# Altium schematic symbol library Connectors.SchLib: 32 symbols
Pins are listed as number, name and electrical type; pins without a type are passive.

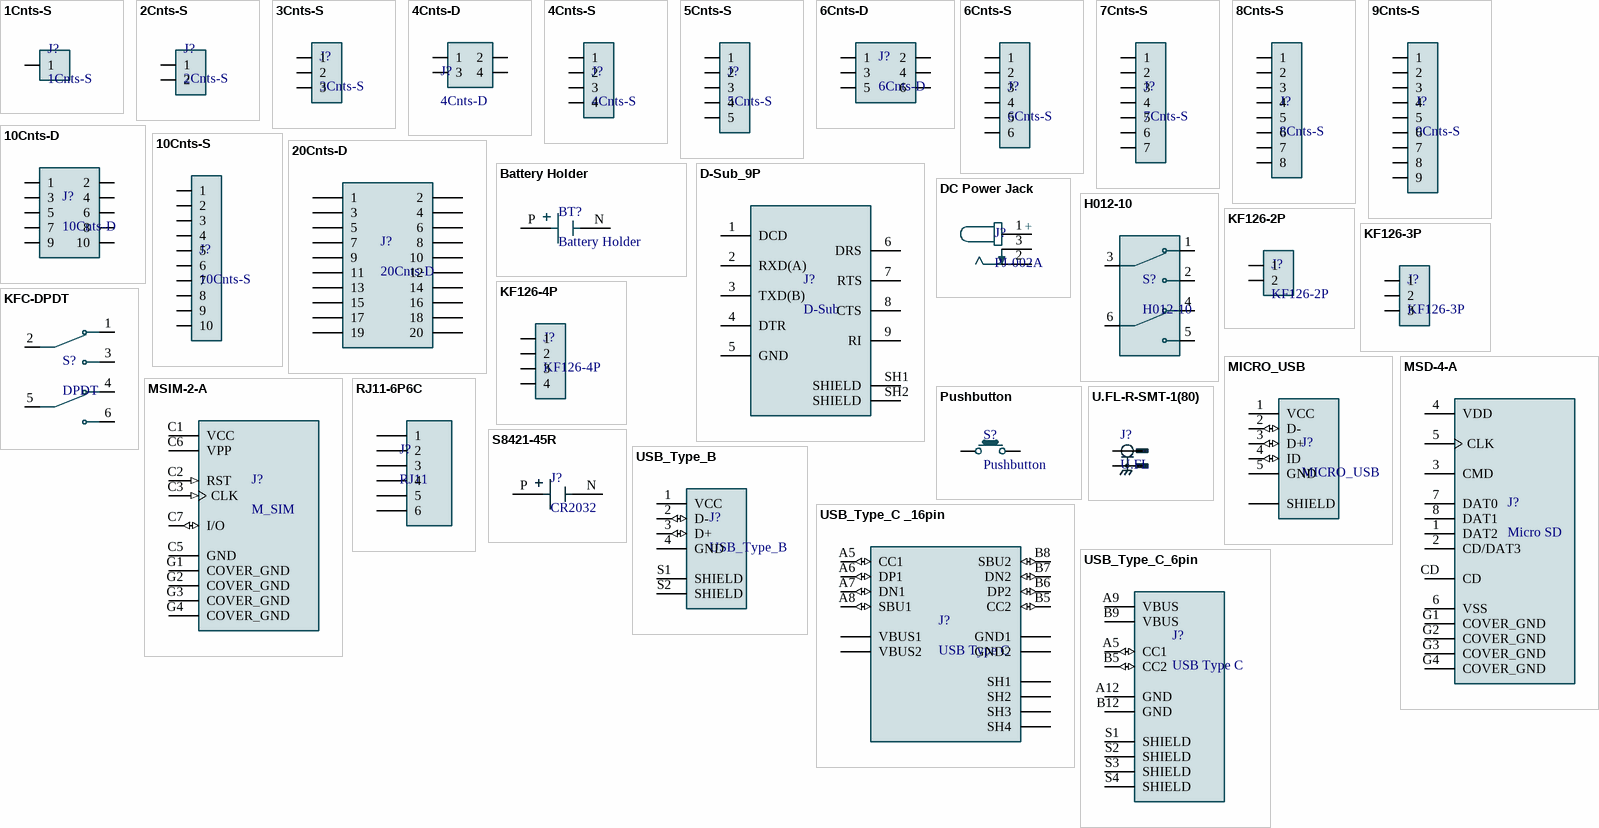
[diagram p0: symbols 1Cnts-S to USB_Type_C_6pin]

## 1Cnts-S
designator J?
MP: MTSW-101-09-G-D-235; Package: None; Price: None; Value: *; Availability: Unavailable
footprint 1Cnts-S
footprint 1Cnts-smart-terminal
footprint 1Cnts-S-Touch (1Cnts-S-Touch-sensor)
footprint Hole3 (3mm)
footprint Hole2 (2mm)
pins: 1

## 2Cnts-S
designator J?
MP: MTSW-101-09-G-D-235; Package: None; Price: None; Value: *; Availability: Unavailable
footprint 2Cnts-S
footprint 2CNTS-Molex
footprint 2CNTS-PH-2mm (JST_B2B-2CNTS-PH-2mm)
footprint 2CNTS-XH-2.5mm (JST_B2B-2CNTS-XH-2.5mm)
footprint 2Cnts-S-Right
footprint 2CNTS-XH-2.5mm-SMD (2pin 2515connecor 2.54 mm pitch male smd)
pins: 1, 2

## 3Cnts-S
designator J?
MP: MTSW-104-06-T-S-115; Price: None; Value: *; Availability: Unavailable; Package: None
footprint 3Cnts-S
footprint 3CNTS-PH-2mm (JST_B2B-3CNTS-PH-2mm)
footprint 3CNTS-XH-2.5mm (JST_B2B-3CNTS-XH-2.5mm)
footprint 3CNTS-XH-2.5mm-SMD (3pin 2515connecor 2.54 mm pitch male smd)
pins: 1, 2, 3

## 4Cnts-D
designator J?
MP: MTSW-103-22-S-D-430; Package: None; Price: None; Value: *; Availability: Unavailable
footprint 4Cnts-D-SMD
pins: 1, 2, 3, 4

## 4Cnts-S
designator J?
MP: MTSW-104-06-T-S-115; Price: None; Value: *; Availability: Unavailable; Package: None
footprint 4Cnts-S
footprint 4CNTS-PH-2mm (JST_B2B-4CNTS-PH-2mm)
footprint 4CNTS-XH-2.5mm (JST_B2B-4CNTS-XH-2.5mm)
footprint 4CNTS-XH-2.5mm-SMD (4pin 2515connecor 2.54 mm pitch male smd)
pins: 1, 2, 3, 4

## 5Cnts-S
designator J?
MP: MTSW-105-10-G-S-640; Price: None; Availability: Unavailable; Value: *; Package: None
footprint 5Cnts-S
footprint 5CNTS-PH-2mm (JST_B2B-5CNTS-PH-2mm)
footprint 5CNTS-XH-2.5mm (JST_B2B-5CNTS-XH-2.5mm)
footprint 5CNTS-XH-2.5mm-SMD (5pin 2515connecor 2.54 mm pitch male smd)
pins: 1, 2, 3, 4, 5

## 6Cnts-D
designator J?
MP: MTSW-103-22-S-D-430; Package: None; Price: None; Value: *; Availability: Unavailable
footprint 6Cnts-D
footprint 6Cnts-D-SMD
pins: 1, 2, 3, 4, 5, 6

## 6Cnts-S
designator J?
MF: Samtec Inc.; MP: TSW-106-XX-X-S; Availability: Unavailable; Package: None; Price: None; Value: *
footprint 6Cnts-S
footprint 6CNTS-XH-2.5mm (JST_B2B-6CNTS-XH-2.5mm)
footprint 6CNTS-PH-2mm (JST_B2B-6CNTS-PH-2mm)
footprint 6CNTS-XH-2.5mm-SMD (6pin 2515connecor 2.54 mm pitch male smd)
pins: 1, 2, 3, 4, 5, 6

## 7Cnts-S
designator J?
MF: Samtec Inc.; MP: TSW-106-XX-X-S; Availability: Unavailable; Package: None; Price: None; Value: *
footprint 7CNTS-XH-2.5mm (JST_B2B-7CNTS-XH-2.5mm)
footprint 7CNTS-PH-2mm (JST_B2B-7CNTS-PH-2mm)
footprint 7CNTS-XH-2.5mm-SMD (7pin 2515connecor 2.54 mm pitch male smd)
pins: 1, 2, 3, 4, 5, 6, 7

## 8Cnts-S
designator J?
MF: Samtec Inc.; MP: TSW-106-XX-X-S; Availability: Unavailable; Package: None; Price: None; Value: *
footprint 8Cnts-S
footprint 8CNTS-XH-2.5mm (JST_B2B-8CNTS-XH-2.5mm)
footprint 8CNTS-PH-2mm (JST_B2B-8CNTS-PH-2mm)
footprint 8CNTS-XH-2.5mm-SMD (8pin 2515connecor 2.54 mm pitch male smd)
pins: 1, 2, 3, 4, 5, 6, 7, 8

## 9Cnts-S
designator J?
MF: Samtec Inc.; MP: TSW-106-XX-X-S; Availability: Unavailable; Package: None; Price: None; Value: *
footprint 9CNTS-XH-2.5mm (JST_B2B-9CNTS-XH-2.5mm)
footprint 9CNTS-PH-2mm (JST_B2B-9CNTS-PH-2mm)
footprint 9CNTS-XH-2.5mm-SMD (9pin 2515connecor 2.54 mm pitch male smd)
pins: 1, 2, 3, 4, 5, 6, 7, 8, 9

## 10Cnts-D
designator J?
MP: MTSW-105-24-T-D-290; MF: Samtec; SnapEDA_Link: https://www.snapeda.com/parts/MTSW-105-24-T-D-290/Samtec/view-part/?ref=snap; Availability: In Stock; Package: None; Check_prices: https://www.snapeda.com/parts/MTSW-105-24-T-D-290/Samtec/view-part/?ref=eda; Value: *; Purchase-URL: https://pricing.snapeda.com/search/part/MTSW-105-24-T-D-290/?ref=eda; Price: None
footprint 10Cnts-D
pins: 1, 2, 3, 4, 5, 6, 7, 8, 9, 10

## 10Cnts-S
designator J?
MF: Samtec Inc.; MP: TSW-106-XX-X-S; Availability: Unavailable; Package: None; Price: None; Value: *
footprint 10CNTS-XH-2.5mm (JST_B2B-10CNTS-XH-2.5mm)
footprint 10CNTS-PH-2mm (JST_B2B-10CNTS-PH-2mm)
footprint 10CNTS-XH-2.5mm-SMD (10pin 2515connecor 2.54 mm pitch male smd)
pins: 1, 2, 3, 4, 5, 6, 7, 8, 9, 10

## 20Cnts-D
designator J?
Centerline_Pitch: 2.54 mm[.1 in]; Product_Type: Connector; MP: 103309-5; Number_of_Positions: 20; MF: TE Connectivity; Package: None; Purchase-URL: https://pricing.snapeda.com/search/part/103309-5/?ref=eda; EU_RoHS_Compliance: Not Compliant; Check_prices: https://www.snapeda.com/parts/103309-5/TE%20Connectivity%20AMP%20Connectors/view-part/202097/?ref=eda; Value: *; SnapEDA_Link: https://www.snapeda.com/parts/103309-5/TE%20Connectivity%20AMP%20Connectors/view-part/202097/?ref=snap; Price: None; Availability: In Stock
footprint 20Cnts-D
pins: 1, 2, 3, 4, 5, 6, 7, 8, 9, 10, 11, 12, 13, 14, 15, 16, 17, 18, 19, 20

## Battery Holder
designator BT?
SMT Battery Holder; MF: Keystone Electronics; MP: 1050; SnapEDA_Link: https://www.snapeda.com/parts/1050/Keystone/view-part/?ref=snap; Package: NON STANDARD-3 Keystone; Value: *; Check_prices: https://www.snapeda.com/parts/1050/Keystone/view-part/?ref=eda
footprint 16340 (CR123A)
footprint 18650
pins: N NEG, P POS

## D-Sub_9P
designator J?, comment D-Sub
Connector D-Sub Standard PLUG FRNT MTLSHL 9P | TE Connectivity 5747840-4; Value: D-Sub_9P; Number_of_Positions: 9; Centerline_Pitch: 2.74 mm[.108 in]; Package: None; Digi-Key_Purchase_URL: https://www.digikey.de/product-detail/en/te-connectivity-amp-connectors/5747840-4/A32092-ND/808647?utm_source=snapeda&utm_medium=aggregator&utm_campaign=symbol; Digi-Key_Part_Number: A32092-ND; TE_purchase_URL: https://www.te.com/usa-en/product-5747840-4.html?te_bu=Cor&te_type=disp&te_campaign=seda_glo_cor-seda-global-disp-prtnr-fy19-seda-model-bom-cta_sma-317_1&elqCampaignId=32493; EU_RoHS_Compliance: Compliant; MP: 5747840-4; SnapEDA_Link: https://www.snapeda.com/parts/5747840-4/TE%20Connectivity%20AMP%20Connectors/view-part/550949/?ref=snap; Product_Type: Connector; MF: TE Connectivity
footprint D-Sub_9P (Connector D-Sub Standard PLUG FRNT MTLSHL 9P)
pins: 1 DCD, 2 RXD(A), 3 TXD(B), 4 DTR, 5 GND, 6 DRS, 7 RTS, 8 CTS, 9 RI, SH1 SHIELD, SH2 SHIELD

## DC Power Jack
designator J?, comment PJ-002A
2.0 x 6.5 mm, 2.5 A, Horizontal, Through Hole, Dc Power Jack Connector; MF: CUI Devices; MP: PJ-002A; Check_prices: https://www.snapeda.com/parts/PJ-002A/CUI+Devices/view-part/?ref=eda; Availability: In Stock; CUI_purchase_URL: https://www.cuidevices.com/product/interconnect/connectors/dc-power-connectors/jacks/pj-002a?utm_source=snapeda.com&utm_medium=referral&utm_campaign=snapedaBOM; SnapEDA_Link: https://www.snapeda.com/parts/PJ-002A/CUI+Devices/view-part/?ref=snap; Purchase-URL: https://pricing.snapeda.com/search/part/PJ-002A/?ref=eda; Price: None; Package: None; Value: *
footprint DC Power Jack (PJ-002A)
footprint DC Power Jack SMD (PJ-002AH-SMT)
pins: 1, 2, 3
text: +

## H012-10
designator S?
H012-10. DECC H012-10 Telephone Hook Switch. Telephone Hook Switch, 6 pins Used in Cyfral Smart-U; MF: Same Sky; MP: MPB04-2C33-S-D; SnapEDA_Link: https://www.snapeda.com/parts/MPB04-2C33-S-D/Same+Sky/view-part/?ref=snap; Package: None; Value: *; Check_prices: https://www.snapeda.com/parts/MPB04-2C33-S-D/Same+Sky/view-part/?ref=eda
footprint H012-10
pins: 1, 2, 3, 4, 5, 6

## KF126-2P
designator J?
Terminal Block Connector Wire Receptacle 2 5 mm 30-16 AWG Green 13.5 A 300 V | TE Connectivity 282836-2; SnapEDA_Link: https://www.snapeda.com/parts/282836-2/TE+Connectivity+AMP+Connectors/view-part/?ref=snap; Package: None; Value: KF126-2P; MF: TE Connectivity; MP: 282836-2; Check_prices: https://www.snapeda.com/parts/282836-2/TE+Connectivity+AMP+Connectors/view-part/?ref=eda
footprint KF126-2P
pins: 1, 2

## KF126-3P
designator J?
TERM BLOCK 3POS SIDE ENTRY 5MM; MP: 282836-3; Price: None; Value: KF126-3P; Package: None; Availability: Unavailable
footprint KF126-3P
pins: 1, 2, 3

## KF126-4P
designator J?
4 Position Wire to Board Terminal Block Horizontal with Board 0.197 (5.00mm) Through Hole; MP: 282836-4; MF: TE Connectivity; Package: None; Availability: In Stock; Value: KF126-4P; Purchase-URL: https://pricing.snapeda.com/search/part/282836-4/?ref=eda; Check_prices: https://www.snapeda.com/parts/282836-4/TE+Connectivity+AMP+Connectors/view-part/?ref=eda; Price: None; SnapEDA_Link: https://www.snapeda.com/parts/282836-4/TE+Connectivity+AMP+Connectors/view-part/?ref=snap
footprint KF126-4P
pins: 1, 2, 3, 4

## KFC-DPDT
designator S?, comment DPDT
Pushbutton Switch DPDT Standard Through Hole 7x7; MF: E-Switch; MP: TL2230EEF140; SnapEDA_Link: https://www.snapeda.com/parts/TL2230EEF140/E-Switch/view-part/?ref=snap; Package: None; Value: *; Check_prices: https://www.snapeda.com/parts/TL2230EEF140/E-Switch/view-part/?ref=eda
footprint KFC-DPDT (Pushbutton Switch DPDT Standard Through Hole 7x7)
pins: 1 NC1, 2 COM1, 3 NO1, 4 NC2, 5 COM2, 6 NO2

## MICRO_USB
designator J?
MICROQTJ; MF: shou han; SnapEDA_Link: https://www.snapeda.com/parts/MICROQTJ/Shouhan/view-part/?ref=snap; Package: None; Value: *; MP: MICROQTJ; Check_prices: https://www.snapeda.com/parts/MICROQTJ/Shouhan/view-part/?ref=eda
footprint MICRO_USB (MICROQTJ)
pins: 1 VCC (power), 2 D- (io), 3 D+ (io), 4 ID (io), 5 GND (power), SH SHIELD

## MSD-4-A
designator J?, comment Micro SD
Micro SD Card Connector, 9 Positions, Connector and Ejector, Push In, Auto Eject Out, Surface Mount, 1.8 mm Height Above Board, Gold Flash; MF: Same Sky; MP: MSD-4-A; SnapEDA_Link: https://www.snapeda.com/parts/MSD-4-A/Same+Sky/view-part/?ref=snap; Package: None; Value: *; Check_prices: https://www.snapeda.com/parts/MSD-4-A/Same+Sky/view-part/?ref=eda
footprint CUI_MSD-4-A (GT-TF003-H0185-02)
pins: 1 DAT2 (power), 2 CD/DAT3 (power), 3 CMD (power), 4 VDD (power), 5 CLK (power), 6 VSS (power), 7 DAT0 (power), 8 DAT1 (power), CD (power), G1 COVER_GND (power), G2 COVER_GND (power), G3 COVER_GND (power), G4 COVER_GND (power)

## MSIM-2-A
designator J?, comment M_SIM
Micro SIM Card Connector, 6 Positions, Connector and Ejector, Push In, Auto Eject Out, Surface Mount, 1.37 mm Height Above Board, Gold Flash; MF: CUI Devices; MP: MSIM-2-A; SnapEDA_Link: https://www.snapeda.com/parts/MSIM-2-A/CUI+Devices/view-part/?ref=snap; Package: None; Value: M_SIM; CUI_purchase_URL: https://www.cuidevices.com/product/interconnect/connectors/memory-card-connectors/sim-card-connectors/msim-2-a?utm_source=snapeda.com&utm_medium=referral&utm_campaign=snapedaBOM; Check_prices: https://www.snapeda.com/parts/MSIM-2-A/CUI+Devices/view-part/?ref=eda
footprint MSIM-2-A (CUI_MSIM-2-A)
pins: C1 VCC (power), C2 RST (in), C3 CLK (in), C5 GND (power), C6 VPP (power), C7 I/O (io), G1 COVER_GND (power), G2 COVER_GND (power), G3 COVER_GND (power), G4 COVER_GND (power)

## Pushbutton
designator S?
Switch,Pushbutton,Tactile,SPST
footprint Pushbutton_2P (Switch,Pushbutton,Tactile,SPST,SMD)
footprint Pushbutton_4P (Switch,Pushbutton,Tactile,SPST,SMD)
footprint Pushbutton_Tactile (PTS525SMG15SMTR2LFS)
footprint Pushbutton_Tactile_mini (SKRPABE010)
pins: 1, 2

## RJ11-6P6C
designator J?, comment RJ11
Jack Modular Right Angle Through Hole RJ12 6 Pos 6 Cnts Gold | Molex Incorporated 95501-2661; SnapEDA_Link: https://www.snapeda.com/parts/95501-2661/Molex/view-part/?ref=snap; Package: None; Value: *; MF: Molex; MP: 95501-2661; Check_prices: https://www.snapeda.com/parts/95501-2661/Molex/view-part/?ref=eda
footprint RJ11-6P6C
pins: 1, 2, 3, 4, 5, 6

## S8421-45R
designator J?, comment CR2032
Coin Cell Battery Retainer, Horizontal SMT, for CR2032 Coin Cell Batteries, Tape & Reeled; MF: Harwin; MP: S8421-45R; SnapEDA_Link: https://www.snapeda.com/parts/S8421-45R/Harwin+Inc./view-part/?ref=snap; Package: None; Value: *; Check_prices: https://www.snapeda.com/parts/S8421-45R/Harwin+Inc./view-part/?ref=eda
footprint S8421-45R (CR2032)
pins: N NEG, P POS

## U.FL-R-SMT-1(80)
designator J?, comment U.FL
U.FL (UMCC) Connector Receptacle, Male Pin 50 Ohms Surface Mount Solder; MP: U.FL-R-SMT-1(80); Package: None; Price: None; Value: *; Availability: Unavailable
footprint U.FL-R-SMT-1(80) (HIROSE_U.FL-R-SMT-1(80))
pins: G1 GND, G2 GND, SIG

## USB_Type_B
designator J?
USB-B (USB TYPE-B) USB 2.0 Receptacle Connector 4 Position Through Hole, Right Angle; MF: Samtec; MP: USB-B-S-F-W-TH-TR; SnapEDA_Link: https://www.snapeda.com/parts/USB-B-S-F-W-TH-TR/Samtec/view-part/?ref=snap; Package: None; Value: *; Check_prices: https://www.snapeda.com/parts/USB-B-S-F-W-TH-TR/Samtec/view-part/?ref=eda
footprint USB_Type_B (USB-B-S-F-W-TH-TR)
pins: 1 VCC (power), 2 D- (io), 3 D+ (io), 4 GND (power), S1 SHIELD, S2 SHIELD

## USB_Type_C _16pin
designator J?, comment USB Type C
USB Type C - Connector, Top-mount SMT, 16pos | Molex Incorporated 217179-0001; SnapEDA_Link: https://www.snapeda.com/parts/217179-0001/Molex/view-part/?ref=snap; Package: None; Value: *; MF: Molex; MP: 217179-0001; Check_prices: https://www.snapeda.com/parts/217179-0001/Molex/view-part/?ref=eda; ComponentLink1Description: link; ComponentLink1URL: https://roboeq.ir/products/detail/1501044/کانکتور-USB-Type-C-مادگی-16-پین-SMD/
footprint USB_Type_C_16pin (USB Type C - Connector, Top-mount SMT, 16pos)
pins: A1B12 GND1 (power), A4B9 VBUS1 (power), A5 CC1 (io), A6 DP1 (io), A7 DN1 (io), A8 SBU1 (io), B1A12 GND2 (power), B4A9 VBUS2 (power), B5 CC2 (io), B6 DP2 (io), B7 DN2 (io), B8 SBU2 (io), SH1, SH2, SH3, SH4

## USB_Type_C_6pin
designator J?, comment USB Type C
USB Charge Only Connector Type C Horizontal Receptacle, 3.16mm profile, 6 Pins, Surface mount, Top mount, low cost; MP: USB4125-GF-A_REVA2; Package: None; Price: None; ComponentLink1Description: link; ComponentLink1URL: https://roboeq.ir/products/detail/1510038/کانکتور-USB-Type-C-مادگی-شش-پین-SMD/; ComponentLink2Description: New link; ComponentLink2URL: https://roboeq.ir/products/detail/1501044/کانکتور-USB-Type-C-مادگی-16-پین-SMD/
footprint USB_Type_C_6pin (USB4125-GF-A)
pins: A5 CC1 (io), A9 VBUS (power), A12 GND (power), B5 CC2 (io), B9 VBUS (power), B12 GND (power), S1 SHIELD, S2 SHIELD, S3 SHIELD, S4 SHIELD